# Altium schematic symbol library Balancer.SchLib: 14 symbols
Pins are listed as number, name and electrical type; pins without a type are passive.

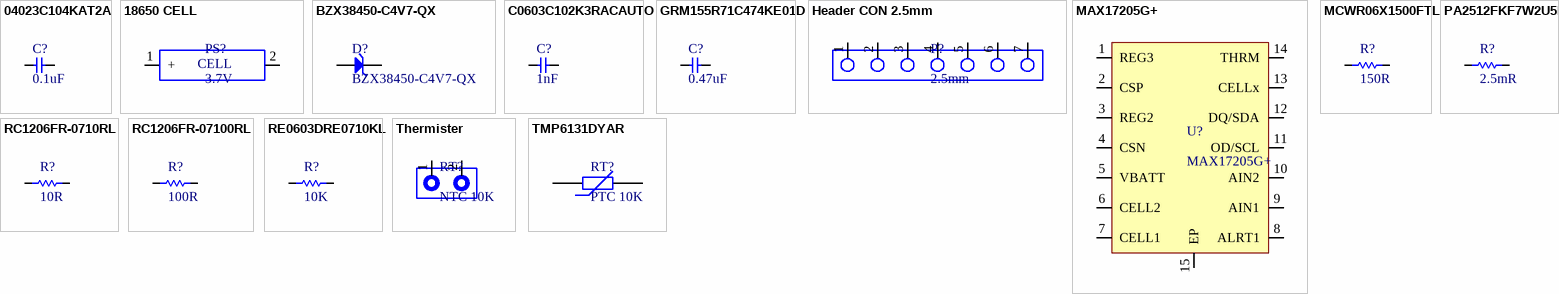
[diagram p0: symbols 04023C104KAT2A to TMP6131DYAR]

## 04023C104KAT2A
designator C?, comment 0.1uF
CAP CER, 0.1 uF, 25 V, ± 10%, X7R, 0402 [1005 Metric]; Manufacturer: Kyocera AVX; Manufacturer Part Number: 04023C104KAT2A; Material: 4241ConductorMaterial; Value: 100nF; Voltage Rating (DC): 25V; Item Type: Capacitor; Supplier: Farnell; Supplier Part Number: 1867948; RoHS: Yes; Category: Ceramic Capacitors; Stock: 226682; Pricing: 10=0.027, 100=0.014, 500=0.009, 2500=0.007, 5000=0.0069 (GBP); Mounting Technology: Surface Mount; Case/Package: 0402; Pins: 2; Case Code (Metric): 1005; Case Code (Imperial): 0402; Min Operating Temperature: -55°C; Max Operating Temperature: 125°C; Tolerance: 10%; Dielectric: X7R; Packaging: Cut Tape; Voltage Rating: 25V; Voltage: 25V; Series: -; Width: 1mm; Reach SVHC Compliant: No; Lead Free: 5697LeadFree; RoHS Compliant: Yes; ComponentLink1URL: https://datasheet.ciiva.com/7614/cx7r-7614663.pdf?src-supplier=Digi-Key; ComponentLink1Description: https://datasheet.ciiva.com/7614/cx7r-7614663.pdf?src-supplier=Digi-Key; ComponentLink2URL: https://datasheet.ciiva.com/6265/cx7r-6265272.pdf?src-supplier=Digi-Key; ComponentLink2Description: https://datasheet.ciiva.com/6265/cx7r-6265272.pdf?src-supplier=Digi-Key; ComponentLink3URL: https://datasheet.ciiva.com/1123/1679506-1123344.pdf?src-supplier=Element14; ComponentLink3Description: https://datasheet.ciiva.com/1123/1679506-1123344.pdf?src-supplier=Element14; ComponentLink4URL: https://datasheet.ciiva.com/14906/cx7r-14906223.pdf?src-supplier=Digi-Key; ComponentLink4Description: https://datasheet.ciiva.com/14906/cx7r-14906223.pdf?src-supplier=Digi-Key; ComponentLink5URL: https://datasheet.ciiva.com/7709/1679506-7709527.pdf?src-supplier=Element14; ComponentLink5Description: https://datasheet.ciiva.com/7709/1679506-7709527.pdf?src-supplier=Element14; ComponentLink6Description: Farnell; ComponentLink6URL: https://uk.farnell.com/avx/04023c104kat2a/cap-0-1-f-25v-10-x7r-0402/dp/1867948
footprint Cap-0402
pins: 1, 2

## 18650 CELL
designator PS?, comment 3.7V
Will only be pads on PCB for Welding. Not CELL holder
footprint 18650 CELL PAD
pins: 1 +, 2 -
text: CELL

## BZX38450-C4V7-QX
designator D?
Zener Diode 4.7 V 300 mW ±5% Surface Mount SOD-323; Manufacturer: Nexperia USA Inc.; Manufacturer Part Number: BZX38450-C4V7-QX; Package: SC-76, SOD-323; Item Type: Diode; ComponentLink1Description: Farnell; ComponentLink1URL: https://uk.farnell.com/nexperia/bzx38450-c4v7-qx/zener-diode-4-7v-0-3w-sc-76/dp/3868843; ComponentLink2Description: Digikey; ComponentLink2URL: https://www.digikey.com/en/products/detail/nexperia-usa-inc/BZX38450-C4V7-QX/16368564
footprint SOD-323
pins: 1 K, 2 A

## C0603C102K3RACAUTO
designator C?, comment 1nF
CAP CER, 1000 pF, 25 V, ± 10%, X7R, 0603 [1608 Metric]; Manufacturer: KEMET; Manufacturer Part Number: C0603C102K3RACAUTO; Dielectric Material: Ceramic; Voltage Rating: 25V; Item Type: Capacitor; Supplier: Newark; Supplier Part Number: 07X0745; RoHS: Yes; Category: Ceramic Capacitors; Stock: 3765; Pricing: 1=0.014 (USD); Mounting Technology: Surface Mount; Package: 0603; Case Code (Metric): 1608; Case Code (Imperial): 0603; Min Operating Temperature: -55°C; Max Operating Temperature: 125°C; Value: 1nF; Tolerance: 10%; Package Quantity: 1; Packaging: Cut Tape; Dielectric: X7R; Voltage Rating (DC): 25V; Series: C; Construction: Flat; Length: 1.6mm; Width: 0.031inch; Height: 0.8mm; Thickness: 0.034inch; Depth: 0.8mm; Ratings: AEC-Q200; Radiation Hardening: No; RoHS Compliant: Yes; Reach SVHC Compliant: No; ComponentLink1URL: https://datasheet.ciiva.com/23913/1751276-23913166.pdf?src-supplier=Newark; ComponentLink1Description: https://datasheet.ciiva.com/23913/1751276-23913166.pdf?src-supplier=Newark; ComponentLink2URL: https://datasheet.ciiva.com/26847/getdatasheetpartid-429233-26847500.pdf?src-supplier=Verical; ComponentLink2Description: https://datasheet.ciiva.com/26847/getdatasheetpartid-429233-26847500.pdf?src-supplier=Verical; ComponentLink3Description: Newark; ComponentLink3URL: https://www.newark.com/kemet/c0603c102k3racauto/mlcc-capacitor-1000pf-25v-x7r/dp/07X0745
footprint Cap-0603
pins: 1, 2

## GRM155R71C474KE01D
designator C?, comment 0.47uF
CAP CER 0.47uF, 16V, X7R, 10% Tol, 0402 Multilayer Ceramic Capacitors MLCC - SMD/SMT ROHS; Manufacturer: Murata Electronics; Manufacturer Part Number: GRM155R71C474KE01D; Package: 0402; LCSC Part Number: C471404; Item Type: Capacitor
footprint Cap-0402
pins: 1, 2

## Header CON 2.5mm
designator P?, comment 2.5mm
2.5mm Pitch, 7 Pin header Connector
footprint Header CON
pins: 1, 2, 3, 4, 5, 6, 7

## MAX17205G+
designator U?
Stand-Alone ModelGauge m5 Fuel Gauge with SHA-256 Authentication; Manufacturer: Maxim; Interface: I2C; Min Supply Voltage: 4.2V; Max Supply Voltage: 20V; Item Type: IC; Supplier 1: Digi-Key; Manufacturer Part Number: MAX17205G+; RoHS: Yes; Category: Battery Management; Stock 1: 490; Pricing 1: 1=6.58, 10=5.913, 25=5.5904, 80=4.845, 230=4.59652, 490=4.12443, 980=3.47844, 2450=3.30452 (USD); Number of Pins: 14; Min Operating Temperature: -40°C; Max Operating Temperature: 85°C; Series: ModelGauge™; Packaging: Rail/Tube; RoHS Compliant: Yes; Reach SVHC Compliant: Unknown; ComponentLink1URL: http://www.farnell.com/datasheets/2339113.pdf?src-supplier=Farnell; ComponentLink1Description: http://www.farnell.com/datasheets/2339113.pdf?src-supplier=Farnell; ComponentLink2URL: http://www.mouser.com/ds/2/256/MAX17201-MAX17215-909430.pdf?src-supplier=Mouser; ComponentLink2Description: http://www.mouser.com/ds/2/256/MAX17201-MAX17215-909430.pdf?src-supplier=Mouser; ComponentLink3URL: https://datasheets.maximintegrated.com/en/ds/MAX17201-MAX17215.pdf?src-supplier=Digi-Key; ComponentLink3Description: https://datasheets.maximintegrated.com/en/ds/MAX17201-MAX17215.pdf?src-supplier=Digi-Key; ComponentLink4URL: http://www.farnell.com/datasheets/2034561.pdf?src-supplier=Element14; ComponentLink4Description: http://www.farnell.com/datasheets/2034561.pdf?src-supplier=Element14; Package: TDFN-14-EP(3x3)
footprint TDFN-14-EP(3x3)
pins: 1 REG3, 2 CSP, 3 REG2, 4 CSN, 5 VBATT, 6 CELL2, 7 CELL1, 8 ALRT1, 9 AIN1, 10 AIN2, 11 OD/SCL, 12 DQ/SDA, 13 CELLx, 14 THRM, 15 EP

## MCWR06X1500FTL
designator R?, comment 150R
SMD RES, 150 Ohm, General Purpose Thick Film 0603 1% 1/10W ±100ppm/°C Ceramic Paper T/R; Manufacturer: Multicomp; Manufacturer Part Number: MCWR06X1500FTL; Voltage Rating: 50V; Power Rating: 100mW; Item Type: Resistor; Supplier: Farnell; Supplier Part Number: 2446572; RoHS: Yes; Stock: 85000; Pricing: 5000=0.001, 25000=0.0009, 50000=0.0008 (GBP); Case/Package: 0603; Case Code (Metric): 1608; Case Code (Imperial): 0603; Value: 150R; Packaging: Tape and Reel; Resistor Type: Thick Film; Temperature Coefficient: 100ppm/°C; Voltage Rating (DC): 50V; Resistance Tolerance: 1%; Reach SVHC Compliant: No; ComponentLink1URL: http://www.farnell.com/datasheets/2563624.pdf?src-supplier=Farnell; ComponentLink1Description: http://www.farnell.com/datasheets/2563624.pdf?src-supplier=Farnell; ComponentLink2URL: http://www.farnell.com/datasheets/2860681.pdf?src-supplier=Farnell; ComponentLink2Description: http://www.farnell.com/datasheets/2860681.pdf?src-supplier=Farnell; ComponentLink3URL: https://datasheet.octopart.com/MCWR06X1500FTL-Multicomp-datasheet-100454308.pdf?src-supplier=Farnell; ComponentLink3Description: https://datasheet.octopart.com/MCWR06X1500FTL-Multicomp-datasheet-100454308.pdf?src-supplier=Farnell; ComponentLink4URL: http://www.farnell.com/datasheets/1849611.pdf?src-supplier=Element14; ComponentLink4Description: http://www.farnell.com/datasheets/1849611.pdf?src-supplier=Element14; ComponentLink5URL: http://www.farnell.com/datasheets/2563624.pdf?src-supplier=Newark; ComponentLink5Description: http://www.farnell.com/datasheets/2563624.pdf?src-supplier=Newark
footprint Res-0603
pins: 1, 2

## PA2512FKF7W2U5E
designator R?, comment 2.5mR
SMD Current Sense Resistor, 0.0025 ohm, PA Series, 2512 [6432 Metric], 2W, ± 1%, Metal Strip; Manufacturer: YAGEO; Manufacturer Part Number: PA2512FKF7W2U5E; ComponentLink1Description: Farnell; ComponentLink1URL: https://nl.farnell.com/yageo/pa2512fkf7w2u5e/res-r0025-1-2w-2512-metal-strip/dp/4169831; Package: 2512; Item Type: Resistor
footprint RES-2512
pins: 1, 2

## RC1206FR-0710RL
designator R?, comment 10R
SMD RES, 10 Ohm, ± 1%, 250 mW, 1206 [3216 Metric], Thick Film, General Purpose; Manufacturer: Yageo; Manufacturer Part Number: RC1206FR-0710RL; Temperature Coefficient: 200ppm/°C; Voltage Rating (DC): 200V; Power Rating: 250mW; Item Type: Resistor; Supplier: Farnell; Supplier Part Number: 2421908; RoHS: Yes; Category: Chip SMD Resistors; Stock: 95000; Pricing: 5000=0.016, 25000=0.014, 50000=0.012 (GBP); Case/Package: 1206; Pins: 2; Case Code (Metric): 3216; Package: 1206; Min Operating Temperature: -55°C; Max Operating Temperature: 155°C; Tolerance: 1%; Value: 10R; Resistor Type: Thick Film; Packaging: Tape and Reel; Voltage Rating: 200V; Number of Terminations: 2; Termination: SMD/SMT; Max Power Dissipation: 250mW; Features: Moisture Resistant; Series: RC; Resistance Tolerance: 1%; Technology: THICK FILM; Voltage Rating (AC): 200V; Length: 3.1mm; Width: 1.6mm; Height: 0.55mm; Depth: 1.6mm; Reach SVHC Compliant: No; Lead Free: Lead Free; RoHS Compliant: Yes; ComponentLink1URL: https://datasheet.ciiva.com/11819/0900766b80c6630a-11819896.pdf?src-supplier=Rs; ComponentLink1Description: https://datasheet.ciiva.com/11819/0900766b80c6630a-11819896.pdf?src-supplier=Rs; ComponentLink2URL: https://datasheet.ciiva.com/22735/444357-22735648.pdf?src-supplier=Farnell; ComponentLink2Description: https://datasheet.ciiva.com/22735/444357-22735648.pdf?src-supplier=Farnell; ComponentLink3URL: https://datasheet.ciiva.com/29181/402303-da-01-en-smd-widerstand-chip1206-10-ohm-29181572.pdf?src-supplier=Conrad; ComponentLink3Description: https://datasheet.ciiva.com/29181/402303-da-01-en-smd-widerstand-chip1206-10-ohm-29181572.pdf?src-supplier=Conrad; ComponentLink4URL: https://datasheet.ciiva.com/46445/444357-46445704.pdf?src-supplier=Element14; ComponentLink4Description: https://datasheet.ciiva.com/46445/444357-46445704.pdf?src-supplier=Element14; ComponentLink5URL: https://datasheet.ciiva.com/2460/pyu-rc1206-51-rohs-l-4-2460048.pdf?src-supplier=Digi-Key; ComponentLink5Description: https://datasheet.ciiva.com/2460/pyu-rc1206-51-rohs-l-4-2460048.pdf?src-supplier=Digi-Key; ComponentLink6URL: https://datasheet.ciiva.com/2460/pyu-rc1206-51-rohs-l-4-2460049.pdf?src-supplier=Digi-Key; ComponentLink6Description: https://datasheet.ciiva.com/2460/pyu-rc1206-51-rohs-l-4-2460049.pdf?src-supplier=Digi-Key; ComponentLink7URL: https://datasheet.ciiva.com/2460/pyu-rc1206-51-rohs-l-4-2460050.pdf?src-supplier=Digi-Key; ComponentLink7Description: https://datasheet.ciiva.com/2460/pyu-rc1206-51-rohs-l-4-2460050.pdf?src-supplier=Digi-Key; ComponentLink8URL: https://datasheet.ciiva.com/16962/pyu-rc1206-51-rohs-l-4-16962857.pdf?src-supplier=Future+Electronics; ComponentLink8Description: https://datasheet.ciiva.com/16962/pyu-rc1206-51-rohs-l-4-16962857.pdf?src-supplier=Future+Electronics; ComponentLink9Description: Farnell; ComponentLink9URL: https://uk.farnell.com/yageo/rc1206fr-0710rl/res-10r-1-0-25w-1206-thick-film/dp/2421908
footprint Res-1206
pins: 1, 2

## RC1206FR-07100RL
designator R?, comment 100R
SMD RES, 100 Ohm, ± 1%, 250 mW, 1206 [3216 Metric], Thick Film, General Purpose; Manufacturer: Yageo; Manufacturer Part Number: RC1206FR-07100RL; Power Rating: 250mW; Voltage Rating: 200V; Temperature Coefficient: 100ppm/°C; Item Type: Resistor; Supplier: Farnell; Supplier Part Number: 9240888; RoHS: Yes; Category: Chip SMD Resistors; Stock: 538979; Pricing: 10=0.022, 100=0.013, 500=0.011, 1000=0.009, 2500=0.0088 (GBP); Package: 1206; Case Code (Imperial): 1206; Case Code (Metric): 3216; Min Operating Temperature: -55°C; Max Operating Temperature: 155°C; Tolerance: 1%; Packaging: Tape and Reel; Value: 100R; Package Quantity: 5000; Termination: SMD/SMT; Resistor Type: Thick Film; Features: Moisture Resistant; Series: RC; Max Power Dissipation: 250mW; Number of Terminations: 2; Resistance Tolerance: 1%; Technology: THICK FILM; Voltage Rating (AC): 200V; Length: 3.1mm; Width: 1.6mm; Height: 0.55mm; Depth: 1.6mm; Lead Free: Lead Free; RoHS Compliant: Yes; Reach SVHC Compliant: Unknown; ComponentLink1URL: https://datasheet.ciiva.com/11808/0900766b80c6630a-11808606.pdf?src-supplier=Rs; ComponentLink1Description: https://datasheet.ciiva.com/11808/0900766b80c6630a-11808606.pdf?src-supplier=Rs; ComponentLink2URL: https://datasheet.ciiva.com/46445/444357-46445702.pdf?src-supplier=Element14; ComponentLink2Description: https://datasheet.ciiva.com/46445/444357-46445702.pdf?src-supplier=Element14; ComponentLink3URL: https://datasheet.ciiva.com/7857/444357-7857241.pdf?src-supplier=Element14; ComponentLink3Description: https://datasheet.ciiva.com/7857/444357-7857241.pdf?src-supplier=Element14; ComponentLink4URL: https://datasheet.ciiva.com/7857/444357-7857242.pdf?src-supplier=Element14; ComponentLink4Description: https://datasheet.ciiva.com/7857/444357-7857242.pdf?src-supplier=Element14; ComponentLink5Description: Farnell; ComponentLink5URL: https://uk.farnell.com/yageo/rc1206fr-07100rl/res-100r-1-0-25w-1206-thick-film/dp/9240888
footprint Res-1206
pins: 1, 2

## RE0603DRE0710KL
designator R?, comment 10K
SMD RES, 10KOhm, ± 0.5%, 100 mW, 0603 [1608 Metric], Thick Film, Ultra Precision; Manufacturer: Yageo; Manufacturer Part Number: RE0603DRE0710KL; Value: 10kR; Max Power Dissipation: 100mW; Temperature Coefficient: 50ppm/°C; Item Type: Resistor; Supplier: Farnell; Supplier Part Number: 1840588; RoHS: Yes; Category: Chip SMD Resistors; Stock: 3920; Pricing: 10=0.025, 100=0.014, 500=0.013, 1000=0.011, 2500=0.009, 5000=0.007, 25000=0.006, 50000=0.005 (GBP); Case/Package: 0603; Min Operating Temperature: -55°C; Max Operating Temperature: 155°C; Packaging: Tape and Reel; Number of Terminations: 2; Tolerance: 0.5%; Features: Moisture Resistant; Series: RE; Length: 0.063inch; Width: 0.032inch; Height: 0.022inch; RoHS Compliant: Yes; ComponentLink1URL: http://www.yageo.com/NewPortal/yageodocoutput?fileName=/pdf/R-Chip/PYu-RE_105_RoHS_L_6.pdf&src-supplier=Digi-Key; ComponentLink1Description: http://www.yageo.com/NewPortal/yageodocoutput?fileName=/pdf/R-Chip/PYu-RE_105_RoHS_L_6.pdf&src-supplier=Digi-Key; ComponentLink2Description: Farnell; ComponentLink2URL: https://uk.farnell.com/yageo/re0603dr-0710kl/res-10k-0-5-0-1w-0603-thick-film/dp/1840588
footprint Res-0603
pins: 1, 2

## Thermister
designator RT?, comment NTC 10K
NTC Thermister 10K
footprint Thermistor
pins: 1, 2

## TMP6131DYAR
designator RT?, comment PTC 10K
Linear Thermister 1%, 10-kΩ in 0402, 0603/0805 and through hole packages 2-SOT-5X3 -40 to 125; Manufacturer: Texas Instruments; Manufacturer Part Number: TMP6131DYAR; Item Type: Resistor; Supplier: Digi-Key; Supplier Part Number: 296-TMP6131DYARCT-ND; RoHS: Yes; Category: Integrated Circuits (ICs); Stock: 10104; Pricing: 1=0.28, 10=0.237, 25=0.2084, 50=0.1956, 100=0.1667, 500=0.13782, 1000=0.11539 (USD); Mounting Technology: Surface Mount; Pins: 2NUMBER; Min Operating Temperature: -40°C; Max Operating Temperature: 125°C; Series: -; Resistance Tolerance: 1%; Length: 800um; Width: 1.2mm; Height: 650um; Thickness: 600um; ComponentLink1URL: http://www.ti.com/general/docs/suppproductinfo.tsp?distId=10&amp;gotoUrl=http%3A%2F%2Fwww.ti.com%2Flit%2Fgpn%2Ftmp61&src-supplier=Digi-Key; ComponentLink1Description: http://www.ti.com/general/docs/suppproductinfo.tsp?distId=10&amp;gotoUrl=http%3A%2F%2Fwww.ti.com%2Flit%2Fgpn%2Ftmp61&src-supplier=Digi-Key; Package: SOD-523; ComponentLink2Description: Digikey; ComponentLink2URL: https://www.digikey.com/en/products/detail/texas-instruments/TMP6131DYAR/11502223
footprint SOD-523
pins: 1, 2